# Altium footprint library Robot_2019.PcbLib: 59 footprints (part 3 of 4)
Each footprint in its own frame and in the unit in brackets; x right, y up, seen from the top. Pads: shape width x height; smd on the part's side, far side on the other; paste and mask are expansions set on the pad; w line width, h text height; cw(c..) or ccw(c..) is an arc to the next point about the centre after c.
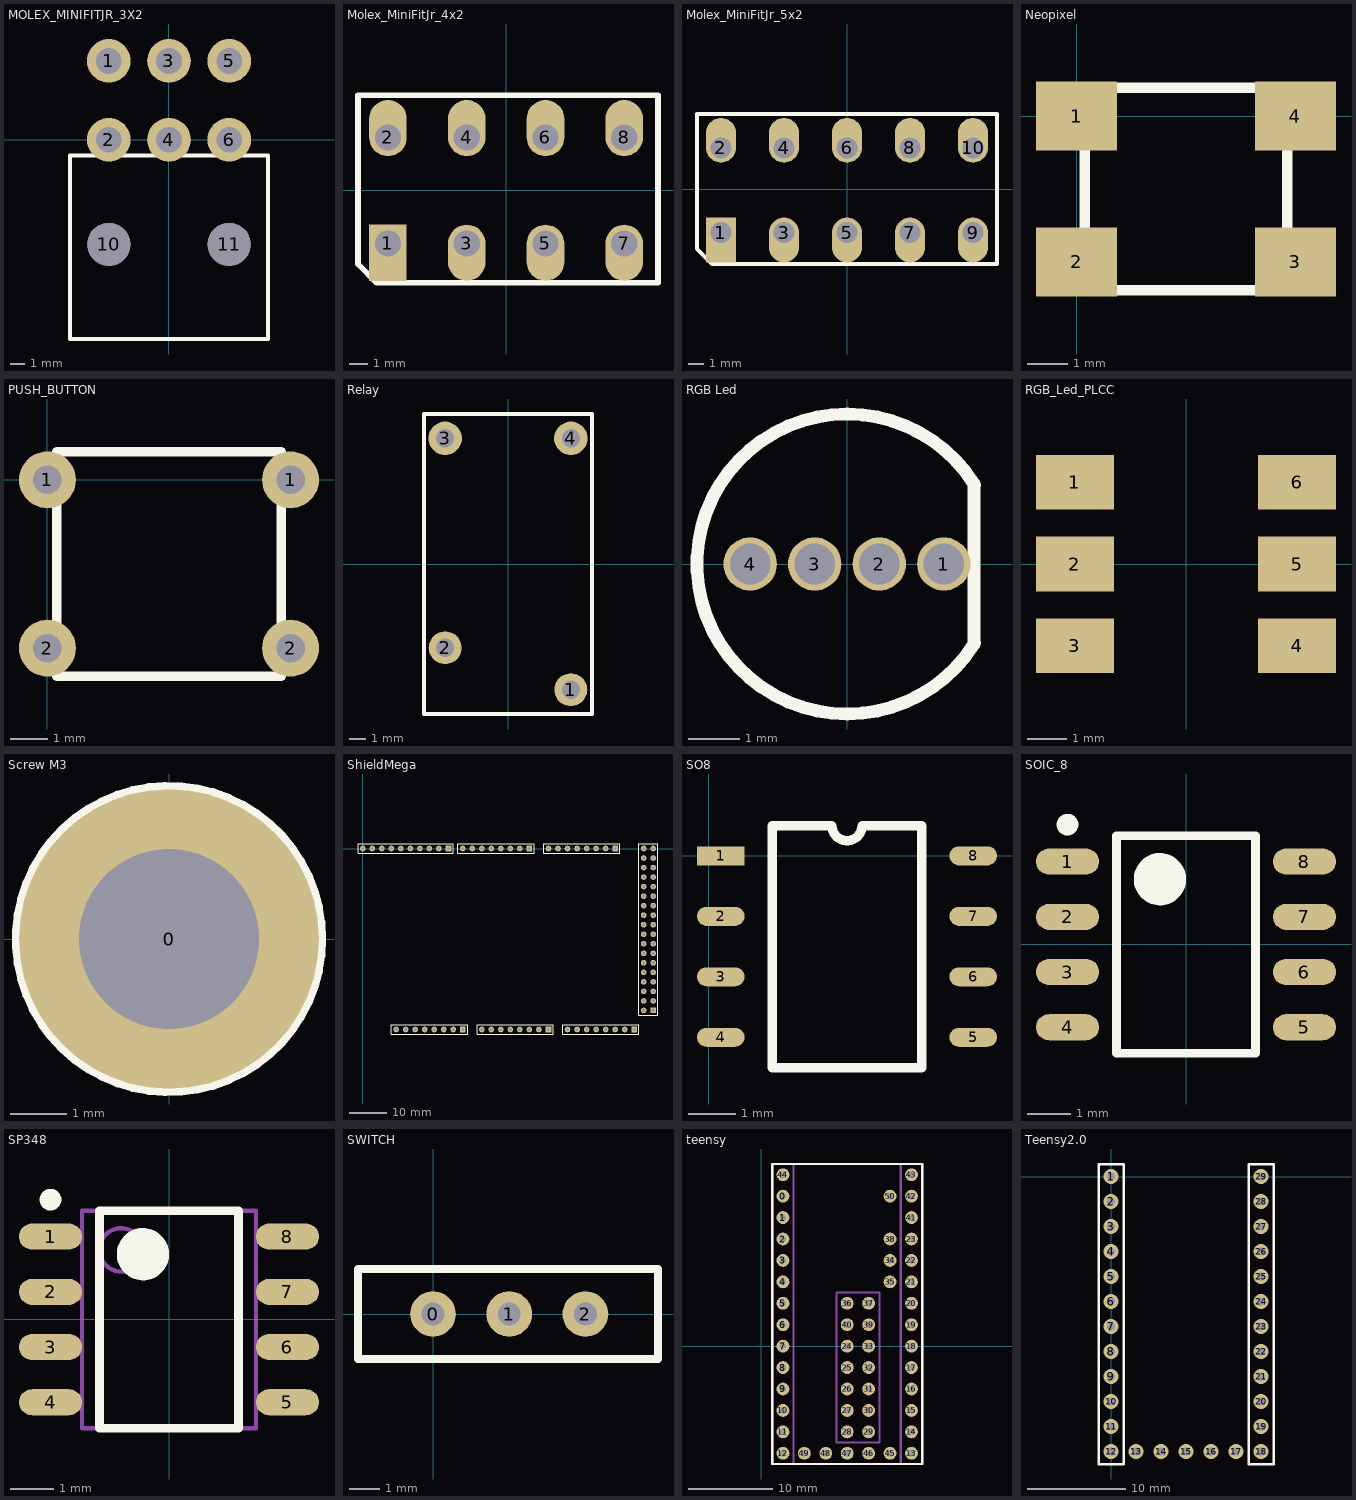
[diagram p2: the footprints below, top view; thin cyan lines are the x and y axes]

## MOLEX_MINIFITJR_3X2 [mm] "MOLEX_MINIFITJR_3X2, 39-30-1060"
height 9.6
pads (8):
  round 3.048 hole 1.8: 1(-4.2,5.5) 2(-4.2,0) 3(0,5.5) 4(0,0) 5(4.2,5.5) 6(4.2,0)
  round 3 hole 3 unplated: 10(-4.2,-7.3) 11(4.2,-7.3)
Top Overlay:
  lines w0.254: -6.9,-13.9 6.9,-13.9 6.9,-1.1 -6.9,-1.1 -6.9,-13.9
3D body "MiniFit_Jr_3x2.stp": height 11.41, standoff -3.59, extent -6.9,-13.9 7.3,6.035

## Molex_MiniFitJr_4x2 [mm] "Connecteur Molex 5x2"
pads (8):
  rect 2x3 hole 1.4 copper offset 0,-0.5: 1(-6.3,-2.825)
  oval 2x3 hole 1.4 copper offset 0,0.5: 2(-6.3,2.825) 4(-2.1,2.825) 6(2.1,2.825) 8(6.3,2.825)
  oval 2x3 hole 1.4 copper offset 0,-0.5: 3(-2.1,-2.825) 5(2.1,-2.825) 7(6.3,-2.825)
Top Overlay:
  lines w0.3: -7.9,-3.925 -6.9,-4.925 8.1,-4.925 8.1,5.075 -7.9,5.075 -7.9,-3.925

## Molex_MiniFitJr_5x2 [mm] "Connecteur Molex 5x2"
pads (10):
  rect 2x3 hole 1.4 copper offset 0,-0.5: 1(-8.4,-2.9)
  oval 2x3 hole 1.4 copper offset 0,0.5: 2(-8.4,2.75) 4(-4.2,2.75) 6(0,2.75) 8(4.2,2.75) 10(8.4,2.75)
  oval 2x3 hole 1.4 copper offset 0,-0.5: 3(-4.2,-2.9) 5(0,-2.9) 7(4.2,-2.9) 9(8.4,-2.9)
Top Overlay:
  lines w0.3: -10,-4 -10,5 10,5 10,-5 -9,-5 -10,-4

## Neopixel [mm]
pads (4):
  rect 2x1.7 smd: 1(0,0) 2(0,-3.6) 3(5.4,-3.6) 4(5.4,0)
Top Overlay:
  lines w0.254: 0.2,-4.3 0.2,0.2 0.7,0.7 5.2,0.7 5.2,-4.3 0.2,-4.3
3D body: height 2, standoff 1, extent 0.693,-3.803 4.693,0.196
3D body: height 1.6, standoff 0, extent 0.192,-4.329 5.193,0.672

## PUSH_BUTTON [mil] "FSM4JH"
height 196.85
pads (4):
  round 60 hole 30: 1(0,0) 1(255.91,0) 2(0,-177.17) 2(255.91,-177.17)
Top Overlay:
  lines w10: 9.84,-206.69 9.84,29.53 246.06,29.53 246.06,-206.69 9.84,-206.69
3D body: height 142.13, standoff 122.44, extent 10.33,-205.71 247.05,31
3D body: height 197.24, standoff 142.13, extent 58.81,-157.22 196.6,-19.46
3D body: height 122.44, standoff 0, extent 9.35,-206.69 246.06,30.02

## Relay [mm] "SPST-NO Relay"
pads (4):
  round 2 hole 1.1: 1(3.81,-7.62) 2(-3.81,-5.08)
  round 2.032 hole 1.1: 3(-3.81,7.62) 4(3.81,7.62)
Top Overlay:
  lines w0.254: -5.093,-9.093 -5.093,9.093 5.093,9.093 5.093,-9.093 -5.093,-9.093
3D body: height 15, standoff 0, extent -5.08,-9.144 5.08,9.144

## RGB Led [mm] "RGB Led"
pads (4):
  round 1.05 hole 0.8: 1(1.905,0) 2(0.635,0) 3(-0.635,0) 4(-1.905,0)
Top Overlay:
  lines w0.254: 2.5,-1.534 2.5,1.5 ; 2.507,-1.554 cw(c0,0) 2.507,1.554
3D body "LED_RGB.stp": height 8.65, standoff -27, extent -2.55,-2.45 2.45,2.45

## RGB_Led_PLCC [mm] "RGB Led PLCC format"
height 2.5
pads (6):
  rect 2x1.4 smd: 1(-2.85,2.1) 2(-2.85,0) 3(-2.85,-2.1) 4(2.85,-2.1) 5(2.85,0) 6(2.85,2.1)

## Screw M3 [mm] "M3 iso Screw"
height 2.86
pads (1):
  round 5.32 hole 3.2 unplated: 0(0,0)
Top Overlay:
  circle w0.254: c0,0 r2.66

## ShieldMega [mm] "Arduino Mega 2560"
pads (86):
  rect 1.5x1.5 hole 0.9: 0(44.45,0) 8(22.86,0) 21(67.31,0) 59(26.67,-48.26) 67(49.53,-48.26) 75(72.39,-48.26) 79(77.47,-43.18)
  round 1.5 hole 0.9: 1(41.91,0) 2(39.37,0) 3(36.83,0) 4(34.29,0) 5(31.75,0) 6(29.21,0) 7(26.67,0) 9(20.32,0) 10(17.78,0) 11(15.24,0) 12(12.7,0) 13(10.16,0) 14(49.53,0) 15(52.07,0) 16(54.61,0) 17(57.15,0) 18(59.69,0) 19(62.23,0) 20(64.77,0) 22(74.93,-2.54) 23(77.47,-2.54) 24(74.93,-5.08) 25(77.47,-5.08) 26(74.93,-7.62) 27(77.47,-7.62) 28(74.93,-10.16) 29(77.47,-10.16) 30(74.93,-12.7) 31(77.47,-12.7) 32(74.93,-15.24) 33(77.47,-15.24) 34(74.93,-17.78) 35(77.47,-17.78) 36(74.93,-20.32) 37(77.47,-20.32) 38(74.93,-22.86) 39(77.47,-22.86) 40(74.93,-25.4) 41(77.47,-25.4) 42(74.93,-27.94) 43(77.47,-27.94) 44(74.93,-30.48) 45(77.47,-30.48) 46(74.93,-33.02) 47(77.47,-33.02) 48(74.93,-35.56) 49(77.47,-35.56) 50(74.93,-38.1) 51(77.47,-38.1) 52(74.93,-40.64) 53(77.47,-40.64) 54(13.97,-48.26) 55(16.51,-48.26) 56(19.05,-48.26) 57(21.59,-48.26) 58(24.13,-48.26) 60(31.75,-48.26) 61(34.29,-48.26) 62(36.83,-48.26) 63(39.37,-48.26) 64(41.91,-48.26) 65(44.45,-48.26) 66(46.99,-48.26) 68(54.61,-48.26) 69(57.15,-48.26) 70(59.69,-48.26) 71(62.23,-48.26) 72(64.77,-48.26) 73(67.31,-48.26) 74(69.85,-48.26) 76(7.62,0) 77(5.08,0) 78(74.93,-43.18) 80(77.47,0) 81(74.93,0) 82(11.43,-48.26) 83(8.89,-48.26) 84(2.54,0) 85(0,0)
Top Overlay:
  lines w0.2: -1.27,-1.27 -1.27,1.27 24.13,1.27 24.13,-1.27 -1.27,-1.27 ; 7.62,-49.53 27.94,-49.53 27.94,-46.99 7.62,-46.99 7.62,-47.625 7.62,-48.895 7.62,-49.53 ; 25.4,-1.27 25.4,1.27 45.72,1.27 45.72,-1.27 25.4,-1.27 ; 30.48,-49.53 30.48,-46.99 50.8,-46.99 50.8,-49.53 30.48,-49.53 ; 48.26,-1.27 68.58,-1.27 68.58,1.27 48.26,1.27 48.26,-1.27 ; 53.34,-49.53 53.34,-46.99 73.66,-46.99 73.66,-49.53 53.34,-49.53 ; 73.66,-44.45 73.66,1.27 78.74,1.27 78.74,-44.45 73.66,-44.45
3D body "Pin Header 1x10 TH Pitch 2.54mm.stp": height 9.5, standoff -3.2, extent -1.27,-1.27 24.13,1.27
3D body "Pin Header 1x10 TH Pitch 2.54mm.stp": height 9.5, standoff -3.2, extent 76.2,-24.13 78.74,1.27
3D body "Pin Header 1x10 TH Pitch 2.54mm.stp": height 9.5, standoff -3.2, extent 73.66,-24.13 76.2,1.27
3D body "Pin Header 1x8 TH Pitch 2.54mm.stp": height 9.5, standoff -3.2, extent 76.2,-44.45 78.74,-24.13
3D body "Pin Header 1x8 TH Pitch 2.54mm.stp": height 9.5, standoff -3.2, extent 73.66,-44.45 76.2,-24.13
3D body "Pin Header 1x8 TH Pitch 2.54mm.stp": height 9.5, standoff -3.2, extent 7.62,-49.53 27.94,-46.99
3D body "Pin Header 1x8 TH Pitch 2.54mm.stp": height 9.5, standoff -3.2, extent 30.48,-49.53 50.8,-46.99
3D body "Pin Header 1x8 TH Pitch 2.54mm.stp": height 9.5, standoff -3.2, extent 53.34,-49.53 73.66,-46.99
3D body "Pin Header 1x8 TH Pitch 2.54mm.stp": height 9.5, standoff -3.2, extent 25.4,-1.27 45.72,1.27
3D body "Pin Header 1x8 TH Pitch 2.54mm.stp": height 9.5, standoff -3.2, extent 48.26,-1.27 68.58,1.27

## SO8 [mm]
pads (8):
  rect 1x0.4 smd: 1(0.25,0)
  oval 1x0.4 smd: 2(0.25,-1.27) 3(0.25,-2.54) 4(0.25,-3.81) 5(5.55,-3.81) 6(5.55,-2.54) 7(5.55,-1.27) 8(5.55,0)
Top Overlay:
  lines w0.2: 1.335,-4.445 4.465,-4.445 4.465,0.635 3.217,0.635 cw(c2.9,0.635) 2.582,0.635 1.335,0.635 1.335,-4.445

## SOIC_8 [mm] "SOIC, 8-Leads, Body 4,90x3,90mm, Pitch 1,27mm, IPC Medium Density"
height 1.75
pads (8):
  oval 1.45x0.6 smd: 1(-2.725,1.905) 2(-2.725,0.635) 3(-2.725,-0.635) 4(-2.725,-1.905) 5(2.725,-1.905) 6(2.725,-0.635) 7(2.725,0.635) 8(2.725,1.905)
Top Overlay:
  circle w0.25: c-2.725,2.755 r0.125
  circle w0.6: c-0.6,1.5 r0.3
  lines w0.2: -1.6,-2.5 -1.6,2.5 1.6,2.5 1.6,-2.5 -1.6,-2.5
3D body: height 1.75, standoff 0.1, extent -2,-2.5 2,2.5

## SP348 [mm] "SOIC, SP348 Transceiver"
height 1.75
pads (8):
  oval 1.45x0.6 smd: 1(-2.725,1.905) 2(-2.725,0.635) 3(-2.725,-0.635) 4(-2.725,-1.905) 5(2.725,-1.905) 6(2.725,-0.635) 7(2.725,0.635) 8(2.725,1.905)
Top Overlay:
  circle w0.6: c-0.6,1.5 r0.3
  circle w0.25: c-2.725,2.755 r0.125
  lines w0.2: -1.6,-2.5 1.6,-2.5 1.6,2.5 -1.6,2.5 -1.6,-2.5
Mechanical 13:
  circle w0.1: c-1.1,1.6 r0.5
  lines w0.1: -2,-2.5 2,-2.5 2,2.5 -2,2.5 -2,-2.5
3D body: height 1.75, standoff 0.1, extent -2,-2.5 2,2.5

## SWITCH [mil] "2 pos switch,  09.03290.01"
height 314.96
pads (3):
  round 60 hole 30: 0(0,0) 1(100,0) 2(200,0)
Top Overlay:
  lines w10: -98.43,-59.06 295.28,-59.06 295.28,59.06 -98.43,59.06 -98.43,-59.06
3D body: height 208.66, standoff 177.17, extent -98.43,-59.06 177.17,59.06
3D body: height 177.17, standoff 0, extent -98.43,-59.06 295.28,59.06
3D body: height 291.34, standoff 208.66, extent 0,-59.06 78.74,59.06

## teensy [mil] "Teensy 3.2"
pads (51):
  round 60 hole 30: 0(100,700) 1(100,600) 2(100,500) 3(100,400) 4(100,300) 5(100,200) 6(100,100) 7(100,0) 8(100,-100) 9(100,-200) 10(100,-300) 11(100,-400) 12(100,-500) 13(700,-500) 14(700,-400) 15(700,-300) 16(700,-200) 17(700,-100) 18(700,0) 19(700,100) 20(700,200) 21(700,300) 22(700,400) 23(700,500) 24(400,0) 25(400,-100) 26(400,-200) 27(400,-300) 28(400,-400) 29(500,-400) 30(500,-300) 31(500,-200) 32(500,-100) 33(500,0) 34(600,400) 35(600,300) 36(400,200) 37(500,200) 38(600,500) 39(500,100) 40(400,100) 41(700,600) 42(700,700) 43(700,800) 44(100,800) 45(600,-500) 46(500,-500) 47(400,-500) 48(300,-500) 49(200,-500) 50(600,700)
Top Overlay:
  lines w10: 50,-550 750,-550 750,850 50,850 50,-550
Mechanical 1:
  lines w10: 48.14,-550 150,-550 150,850 50,850 50,-548.14 48.14,-550 ; 350,-450 550,-450 550,250 350,250 350,-450 ; 650,-550 750,-550 750,850 650,850 650,-550
3D body: height 331.89, standoff 0, extent 350.02,-449.98 549.98,249.98
3D body: height 331.89, standoff 0, extent 48.09,-550.02 150.02,850.02
3D body: height 331.89, standoff 0, extent 650.02,-549.98 749.98,849.98
3D body "Teensy_3-2.stp": height 504.76, standoff 253.15, extent 48.14,-550 751.86,906.68

## Teensy2.0 [mil] "Teensy2.0 with minimal"
pads (29):
  round 60 hole 31.5: 1(0,0) 2(0,-100) 3(0,-200) 4(0,-300) 5(0,-400) 6(0,-500) 7(0,-600) 8(0,-700) 9(0,-800) 10(0,-900) 11(0,-1000) 12(0,-1100) 13(100,-1100) 14(200,-1100) 15(300,-1100) 16(400,-1100) 17(500,-1100) 18(600,-1100) 19(600,-1000) 20(600,-900) 21(600,-800) 22(600,-700) 23(600,-600) 24(600,-500) 25(600,-400) 26(600,-300) 27(600,-200) 28(600,-100) 29(600,0)
Top Overlay:
  lines w10: -50,-1150 -50,50 50,50 50,-1150 -50,-1150 ; 550,-1150 650,-1150 650,50 550,50 550,-1150
3D body: height 255.91, standoff 0, extent 50,-1150 550,-1050
3D body: height 255.91, standoff 0, extent 550,-1150 650,50
3D body: height 255.91, standoff 0, extent -50,-1150 50,50